# Altium footprint library 324921046.PcbLib: 1 footprints
Each footprint in its own frame and in the unit in brackets; x right, y up, seen from the top. Pads: shape width x height; smd on the part's side, far side on the other; paste and mask are expansions set on the pad; w line width, h text height; cw(c..) or ccw(c..) is an arc to the next point about the centre after c.
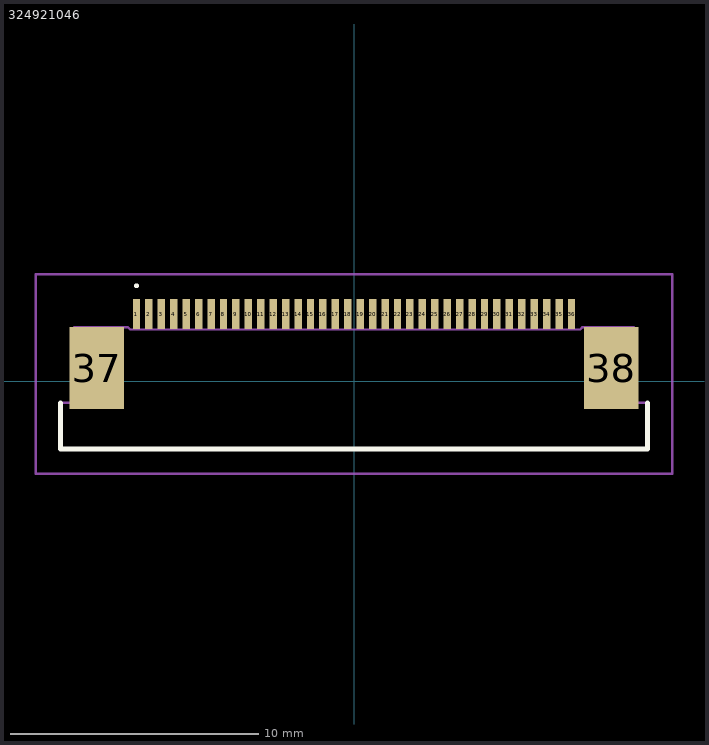
[diagram p0: the footprint, top view; thin cyan lines are the x and y axes]

## 324921046 [mm]
pads (38):
  rect 0.3x1.2 smd: 1(-8.75,2.71) 2(-8.25,2.71) 3(-7.75,2.71) 4(-7.25,2.71) 5(-6.75,2.71) 6(-6.25,2.71) 7(-5.75,2.71) 8(-5.25,2.71) 9(-4.75,2.71) 10(-4.25,2.71) 11(-3.75,2.71) 12(-3.25,2.71) 13(-2.75,2.71) 14(-2.25,2.71) 15(-1.75,2.71) 16(-1.25,2.71) 17(-0.75,2.71) 18(-0.25,2.71) 19(0.25,2.71) 20(0.75,2.71) 21(1.25,2.71) 22(1.75,2.71) 23(2.25,2.71) 24(2.75,2.71) 25(3.25,2.71) 26(3.75,2.71) 27(4.25,2.71) 28(4.75,2.71) 29(5.25,2.71) 30(5.75,2.71) 31(6.25,2.71) 32(6.75,2.71) 33(7.25,2.71) 34(7.75,2.71) 35(8.25,2.71) 36(8.75,2.71)
  rect 2.2x3.3 smd: 37(-10.35,0.54) 38(10.35,0.54)
Top Overlay:
  lines w0.1: -8.75,3.8 -8.75,3.8 ; -8.75,3.8 ccw(c-8.75,3.85) -8.75,3.9 ; -8.75,3.8 cw(c-8.75,3.85) -8.75,3.9 ; -8.75,3.9 -8.75,3.9
  lines w0.2: -11.8,-0.86 -11.8,-2.71 11.8,-2.71 11.8,-0.86
Mechanical 15:
  lines w0.1: -11.8,-2.71 -11.8,-0.86 -11.25,-0.86 -11.25,2.19 -9.1,2.19 -9,2.09 9.1,2.09 9.2,2.19 11.25,2.19 11.25,-0.86 11.8,-0.86 11.8,-2.71 0,-2.71 -11.8,-2.71
Mechanical 20:
  lines w0.1: -12.8,-3.71 12.8,-3.71 12.8,4.31 -12.8,4.31 -12.8,-3.71